# Altium integrated library XIAO_ESP32C3.IntLib: 1 symbol
Pins are listed as number, name and electrical type; pins without a type are passive.

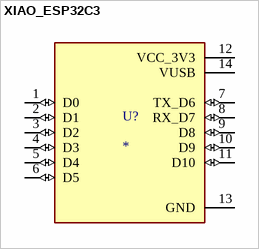
[diagram p0: symbol XIAO_ESP32C3]

## XIAO_ESP32C3
designator U?
Dev.kit: evaluation; u.FL antenna,prototype board; XIAO; PIN: 2x7; MF: Seeed Studio; MP: XIAO ESP32C3; SnapEDA_Link: https://www.snapeda.com/parts/XIAO%20ESP32C3/Seeed+Studio/view-part/?ref=snap; Package: None; Value: *; Check_prices: https://www.snapeda.com/parts/XIAO%20ESP32C3/Seeed+Studio/view-part/?ref=eda
footprint MODULE_XIAO_ESP32C3
pins: 1 D0 (io), 2 D1 (io), 3 D2 (io), 4 D3 (io), 5 D4 (io), 6 D5 (io), 7 TX_D6 (io), 8 RX_D7 (io), 9 D8 (io), 10 D9 (io), 11 D10 (io), 12 VCC_3V3 (power), 13 GND (power), 14 VUSB (power)